# Altium schematic symbol library 2020-05-17_08-33-02.SchLib: 2 symbols
Pins are listed as number, name and electrical type; pins without a type are passive.

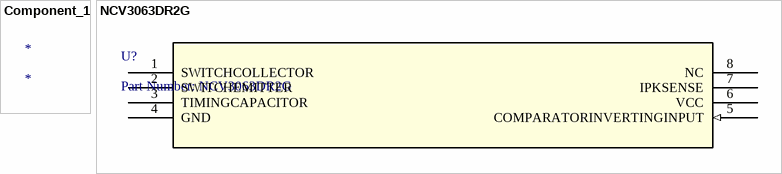
[diagram p0: symbols Component_1 to NCV3063DR2G]

## Component_1
designator *

## NCV3063DR2G
designator U?, comment Part Number: NCV3063DR2G
No Description Available; Vendor: ON Semiconductor; Manufacturer_Part_Number: NCV3063DR2G; Copyright: Copyright (C) 2016 Accelerated Designs. All rights reserved; RefDes: RefDes; Type: DEV; Value: Value
footprint SOIC8
pins: 1 SWITCHCOLLECTOR, 2 SWITCHEMITTER, 3 TIMINGCAPACITOR, 4 GND (power), 5 COMPARATORINVERTINGINPUT (in), 6 VCC (power), 7 IPKSENSE, 8 NC